# Altium footprint library WR-TBL_Pluggable Connector_3.50mm.PcbLib: 175 footprints (part 11 of 11)
Each footprint in its own frame and in the unit in brackets; x right, y up, seen from the top. Pads: shape width x height; smd on the part's side, far side on the other; paste and mask are expansions set on the pad; w line width, h text height; cw(c..) or ccw(c..) is an arc to the next point about the centre after c.
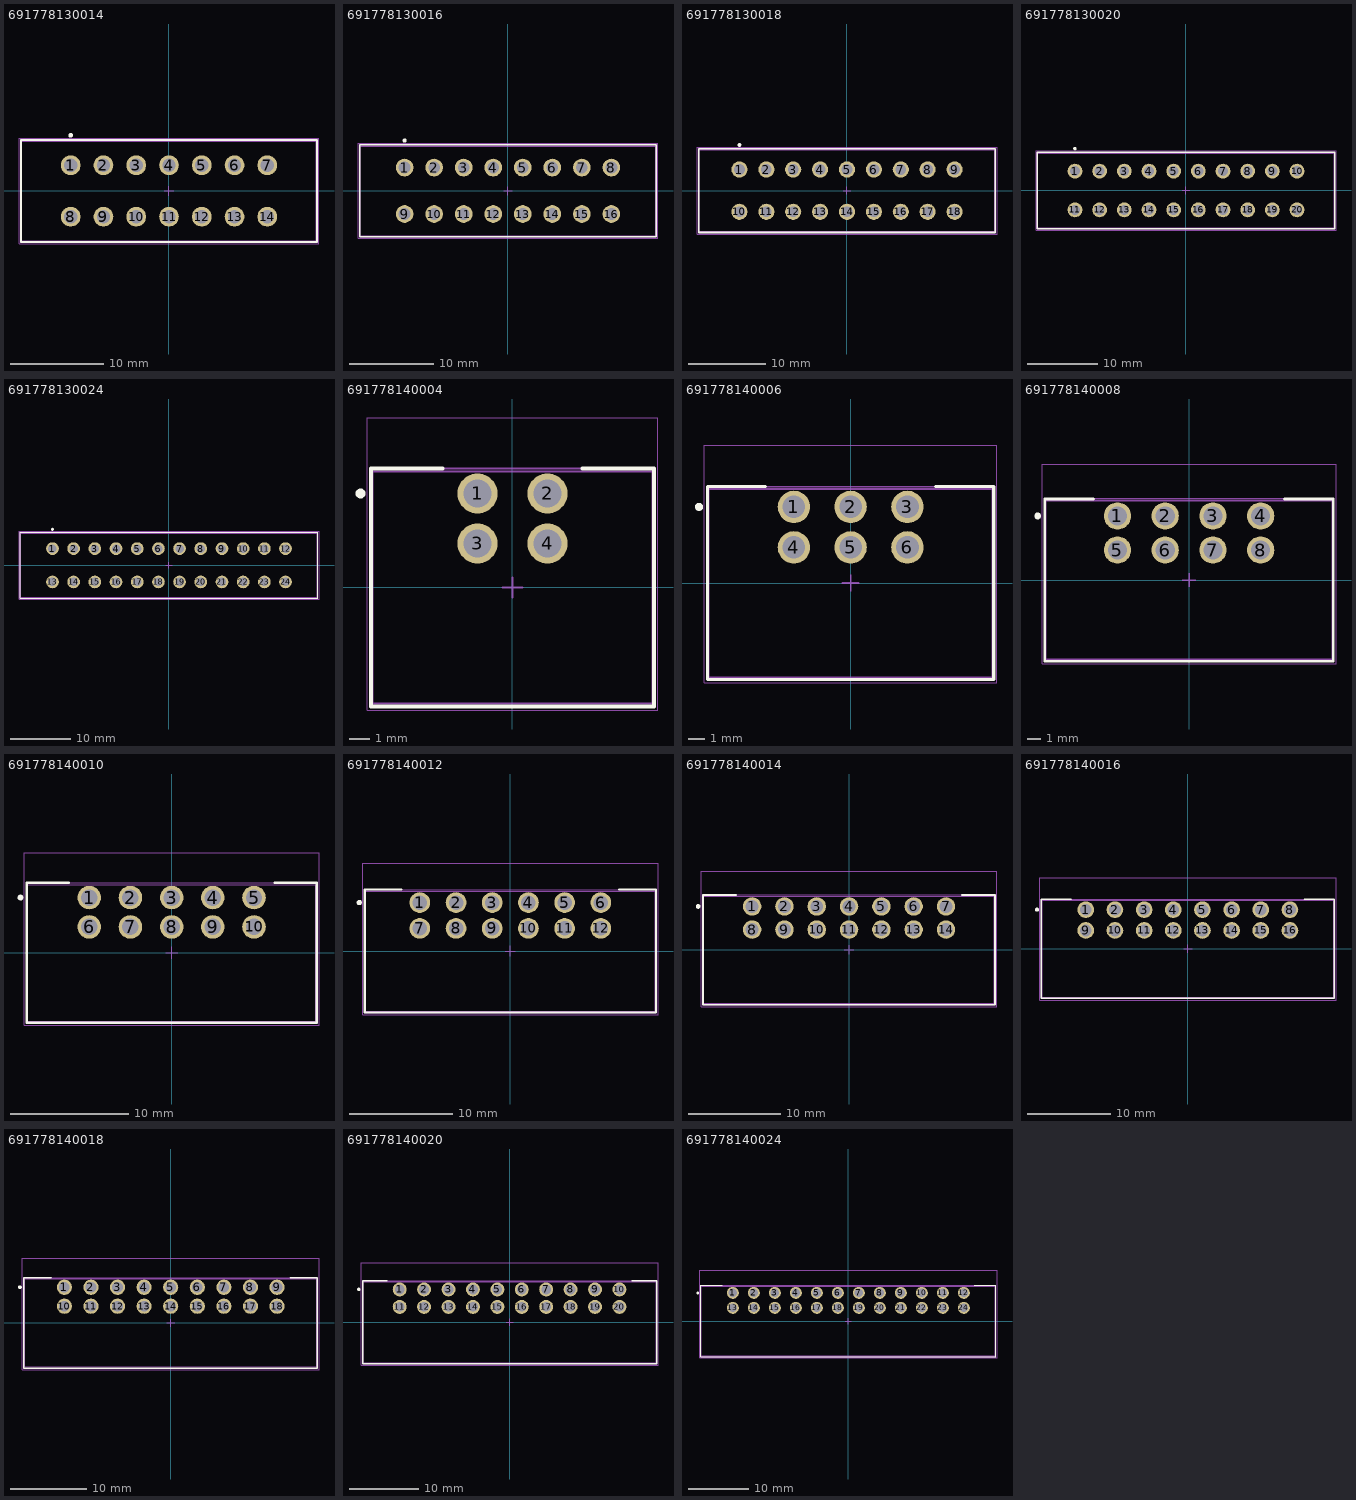
[diagram p10: the footprints below, top view; thin cyan lines are the x and y axes]

## 691778130014 [mm] "PCB Header, pitch 3.5mm, 14p"
height 10
pads (14):
  round 2.1 hole 1.4: 1(-10.5,2.75) 2(-7,2.75) 3(-3.5,2.75) 4(0,2.75) 5(3.5,2.75) 6(7,2.75) 7(10.5,2.75) 8(-10.5,-2.75) 9(-7,-2.75) 10(-3.5,-2.75) 11(0,-2.75) 12(3.5,-2.75) 13(7,-2.75) 14(10.5,-2.75)
Top Overlay:
  circle w0.25: c-10.5,5.95 r0.125
  lines w0.2: -15.825,-5.45 -15.825,5.45 15.825,5.45 15.825,-5.45 -15.825,-5.45
Top Paste:
  region: 9,-0.4 12,-0.4 12,-5.05 9,-5.05
  region: 5.5,-0.4 8.5,-0.4 8.5,-5.05 5.5,-5.05
  region: 2,-0.4 5,-0.4 5,-5.05 2,-5.05
  region: -1.5,-0.4 1.5,-0.4 1.5,-5.05 -1.5,-5.05
  region: -5,-0.4 -2,-0.4 -2,-5.05 -5,-5.05
  region: -8.5,-0.4 -5.5,-0.4 -5.5,-5.05 -8.5,-5.05
  region: -12,-0.4 -9,-0.4 -9,-5.05 -12,-5.05
  region: 9,5.1 12,5.1 12,0.45 9,0.45
  region: 5.5,5.1 8.5,5.1 8.5,0.45 5.5,0.45
  region: 2,5.1 5,5.1 5,0.45 2,0.45
  region: -5,5.1 -2,5.1 -2,0.45 -5,0.45
  region: -12,5.1 -9,5.1 -9,0.45 -12,0.45
  region: -8.5,5.1 -5.5,5.1 -5.5,0.45 -8.5,0.45
  region: -1.5,5.1 1.5,5.1 1.5,0.45 -1.5,0.45
Assembly Notes:
  text "Stencil Thickness: 120um" at -5.048,-6.37 h1
Top Assembly:
  lines w0.1: -15.825,-5.45 -15.825,5.45 15.825,5.45 15.825,-5.45 -15.825,-5.45
Top Designator:
  text ".Designator" at -3.647,-0.357 h1
Top 3D Body:
  lines w0.1: -15.75,-5.3 -15.75,5.3 15.75,5.3 15.75,-5.3 -15.75,-5.3
Top Courtyard:
  lines w0.05: -16.025,-5.65 -16.025,5.65 16.025,5.65 16.025,-5.65 -16.025,-5.65
Top Component Center:
  lines w0.1: -0.5,0 0.5,0 ; 0,-0.5 0,0.5
3D body "691778130014.stp": height 10.05, standoff -1.95, extent -15.75,-5.3 15.75,5.3

## 691778130016 [mm] "PCB Header, pitch 3.5mm, 16p"
height 10
pads (16):
  round 2.1 hole 1.4: 1(-12.25,2.75) 2(-8.75,2.75) 3(-5.25,2.75) 4(-1.75,2.75) 5(1.75,2.75) 6(5.25,2.75) 7(8.75,2.75) 8(12.25,2.75) 9(-12.25,-2.75) 10(-8.75,-2.75) 11(-5.25,-2.75) 12(-1.75,-2.75) 13(1.75,-2.75) 14(5.25,-2.75) 15(8.75,-2.75) 16(12.25,-2.75)
Top Overlay:
  circle w0.25: c-12.25,5.95 r0.125
  lines w0.2: -17.575,-5.45 -17.575,5.45 17.575,5.45 17.575,-5.45 -17.575,-5.45
Top Paste:
  region: 3.75,-0.4 6.75,-0.4 6.75,-5.05 3.75,-5.05
  region: 0.25,-0.4 3.25,-0.4 3.25,-5.05 0.25,-5.05
  region: -3.25,-0.4 -0.25,-0.4 -0.25,-5.05 -3.25,-5.05
  region: -6.75,-0.4 -3.75,-0.4 -3.75,-5.05 -6.75,-5.05
  region: -10.25,-0.4 -7.25,-0.4 -7.25,-5.05 -10.25,-5.05
  region: -13.75,-0.4 -10.75,-0.4 -10.75,-5.05 -13.75,-5.05
  region: 10.75,5.1 13.75,5.1 13.75,0.45 10.75,0.45
  region: 7.25,5.1 10.25,5.1 10.25,0.45 7.25,0.45
  region: 3.75,5.1 6.75,5.1 6.75,0.45 3.75,0.45
  region: 0.25,5.1 3.25,5.1 3.25,0.45 0.25,0.45
  region: -6.75,5.1 -3.75,5.1 -3.75,0.45 -6.75,0.45
  region: -13.75,5.1 -10.75,5.1 -10.75,0.45 -13.75,0.45
  region: -10.25,5.1 -7.25,5.1 -7.25,0.45 -10.25,0.45
  region: -3.25,5.1 -0.25,5.1 -0.25,0.45 -3.25,0.45
  region: 7.25,-0.4 10.25,-0.4 10.25,-5.05 7.25,-5.05
  region: 10.75,-0.4 13.75,-0.4 13.75,-5.05 10.75,-5.05
Assembly Notes:
  text "Stencil Thickness: 120um" at -5.048,-6.37 h1
Top Assembly:
  lines w0.1: -17.575,-5.45 -17.575,5.45 17.575,5.45 17.575,-5.45 -17.575,-5.45
Top Designator:
  text ".Designator" at -3.647,-0.357 h1
Top 3D Body:
  lines w0.1: -17.5,-5.3 -17.5,5.3 17.5,5.3 17.5,-5.3 -17.5,-5.3
Top Courtyard:
  lines w0.05: -17.775,-5.65 -17.775,5.65 17.775,5.65 17.775,-5.65 -17.775,-5.65
Top Component Center:
  lines w0.1: -0.5,0 0.5,0 ; 0,-0.5 0,0.5
3D body "691778130016.stp": height 10.05, standoff -1.95, extent -17.5,-5.3 17.5,5.3

## 691778130018 [mm] "PCB Header, pitch 3.5mm, 18p"
height 10
pads (18):
  round 2.1 hole 1.4: 1(-14,2.75) 2(-10.5,2.75) 3(-7,2.75) 4(-3.5,2.75) 5(0,2.75) 6(3.5,2.75) 7(7,2.75) 8(10.5,2.75) 9(14,2.75) 10(-14,-2.75) 11(-10.5,-2.75) 12(-7,-2.75) 13(-3.5,-2.75) 14(0,-2.75) 15(3.5,-2.75) 16(7,-2.75) 17(10.5,-2.75) 18(14,-2.75)
Top Overlay:
  circle w0.25: c-14,5.95 r0.125
  lines w0.2: -19.325,-5.45 -19.325,5.45 19.325,5.45 19.325,-5.45 -19.325,-5.45
Top Paste:
  region: -1.5,-0.4 1.5,-0.4 1.5,-5.05 -1.5,-5.05
  region: -5,-0.4 -2,-0.4 -2,-5.05 -5,-5.05
  region: -8.5,-0.4 -5.5,-0.4 -5.5,-5.05 -8.5,-5.05
  region: -12,-0.4 -9,-0.4 -9,-5.05 -12,-5.05
  region: -15.5,-0.4 -12.5,-0.4 -12.5,-5.05 -15.5,-5.05
  region: 12.5,5.1 15.5,5.1 15.5,0.45 12.5,0.45
  region: 9,5.1 12,5.1 12,0.45 9,0.45
  region: 5.5,5.1 8.5,5.1 8.5,0.45 5.5,0.45
  region: 2,5.1 5,5.1 5,0.45 2,0.45
  region: -1.5,5.1 1.5,5.1 1.5,0.45 -1.5,0.45
  region: -8.5,5.1 -5.5,5.1 -5.5,0.45 -8.5,0.45
  region: -15.5,5.1 -12.5,5.1 -12.5,0.45 -15.5,0.45
  region: -12,5.1 -9,5.1 -9,0.45 -12,0.45
  region: -5,5.1 -2,5.1 -2,0.45 -5,0.45
  region: 2,-0.4 5,-0.4 5,-5.05 2,-5.05
  region: 5.5,-0.4 8.5,-0.4 8.5,-5.05 5.5,-5.05
  region: 9,-0.4 12,-0.4 12,-5.05 9,-5.05
  region: 12.5,-0.4 15.5,-0.4 15.5,-5.05 12.5,-5.05
Assembly Notes:
  text "Stencil Thickness: 120um" at -5.048,-6.37 h1
Top Assembly:
  lines w0.1: -19.325,-5.45 -19.325,5.45 19.325,5.45 19.325,-5.45 -19.325,-5.45
Top Designator:
  text ".Designator" at -3.647,-0.357 h1
Top 3D Body:
  lines w0.1: -19.25,-5.3 -19.25,5.3 19.25,5.3 19.25,-5.3 -19.25,-5.3
Top Courtyard:
  lines w0.05: -19.525,-5.65 -19.525,5.65 19.525,5.65 19.525,-5.65 -19.525,-5.65
Top Component Center:
  lines w0.1: -0.5,0 0.5,0 ; 0,-0.5 0,0.5
3D body "691778130018.stp": height 10.05, standoff -1.95, extent -19.25,-5.3 19.25,5.3

## 691778130020 [mm] "PCB Header, pitch 3.5mm, 20p"
height 10
pads (20):
  round 2.1 hole 1.4: 1(-15.75,2.75) 2(-12.25,2.75) 3(-8.75,2.75) 4(-5.25,2.75) 5(-1.75,2.75) 6(1.75,2.75) 7(5.25,2.75) 8(8.75,2.75) 9(12.25,2.75) 10(15.75,2.75) 11(-15.75,-2.75) 12(-12.25,-2.75) 13(-8.75,-2.75) 14(-5.25,-2.75) 15(-1.75,-2.75) 16(1.75,-2.75) 17(5.25,-2.75) 18(8.75,-2.75) 19(12.25,-2.75) 20(15.75,-2.75)
Top Overlay:
  circle w0.25: c-15.75,5.95 r0.125
  lines w0.2: -21.075,-5.45 -21.075,5.45 21.075,5.45 21.075,-5.45 -21.075,-5.45
Top Paste:
  region: -6.75,-0.4 -3.75,-0.4 -3.75,-5.05 -6.75,-5.05
  region: -10.25,-0.4 -7.25,-0.4 -7.25,-5.05 -10.25,-5.05
  region: -13.75,-0.4 -10.75,-0.4 -10.75,-5.05 -13.75,-5.05
  region: -17.25,-0.4 -14.25,-0.4 -14.25,-5.05 -17.25,-5.05
  region: 14.25,5.1 17.25,5.1 17.25,0.45 14.25,0.45
  region: 10.75,5.1 13.75,5.1 13.75,0.45 10.75,0.45
  region: 7.25,5.1 10.25,5.1 10.25,0.45 7.25,0.45
  region: 3.75,5.1 6.75,5.1 6.75,0.45 3.75,0.45
  region: 0.25,5.1 3.25,5.1 3.25,0.45 0.25,0.45
  region: -3.25,5.1 -0.25,5.1 -0.25,0.45 -3.25,0.45
  region: -10.25,5.1 -7.25,5.1 -7.25,0.45 -10.25,0.45
  region: -17.25,5.1 -14.25,5.1 -14.25,0.45 -17.25,0.45
  region: -13.75,5.1 -10.75,5.1 -10.75,0.45 -13.75,0.45
  region: -6.75,5.1 -3.75,5.1 -3.75,0.45 -6.75,0.45
  region: -3.25,-0.4 -0.25,-0.4 -0.25,-5.05 -3.25,-5.05
  region: 0.25,-0.4 3.25,-0.4 3.25,-5.05 0.25,-5.05
  region: 3.75,-0.4 6.75,-0.4 6.75,-5.05 3.75,-5.05
  region: 7.25,-0.4 10.25,-0.4 10.25,-5.05 7.25,-5.05
  region: 10.75,-0.4 13.75,-0.4 13.75,-5.05 10.75,-5.05
  region: 14.25,-0.4 17.25,-0.4 17.25,-5.05 14.25,-5.05
Assembly Notes:
  text "Stencil Thickness: 120um" at -5.048,-6.37 h1
Top Assembly:
  lines w0.1: -21.075,-5.45 -21.075,5.45 21.075,5.45 21.075,-5.45 -21.075,-5.45
Top Designator:
  text ".Designator" at -3.647,-0.357 h1
Top 3D Body:
  lines w0.1: -21,-5.3 -21,5.3 21,5.3 21,-5.3 -21,-5.3
Top Courtyard:
  lines w0.05: -21.275,-5.65 -21.275,5.65 21.275,5.65 21.275,-5.65 -21.275,-5.65
Top Component Center:
  lines w0.1: -0.5,0 0.5,0 ; 0,-0.5 0,0.5
3D body "691778130020.stp": height 10.05, standoff -1.95, extent -21,-5.3 21,5.3

## 691778130024 [mm] "PCB Header, pitch 3.5mm, 24p"
height 10
pads (24):
  round 2.1 hole 1.4: 1(-19.25,2.75) 2(-15.75,2.75) 3(-12.25,2.75) 4(-8.75,2.75) 5(-5.25,2.75) 6(-1.75,2.75) 7(1.75,2.75) 8(5.25,2.75) 9(8.75,2.75) 10(12.25,2.75) 11(15.75,2.75) 12(19.25,2.75) 13(-19.25,-2.75) 14(-15.75,-2.75) 15(-12.25,-2.75) 16(-8.75,-2.75) 17(-5.25,-2.75) 18(-1.75,-2.75) 19(1.75,-2.75) 20(5.25,-2.75) 21(8.75,-2.75) 22(12.25,-2.75) 23(15.75,-2.75) 24(19.25,-2.75)
Top Overlay:
  circle w0.25: c-19.25,5.95 r0.125
  lines w0.2: -24.575,-5.45 24.575,-5.45 24.575,5.45 -24.575,5.45 -24.575,-5.45
Top Paste:
  region: 17.75,-0.4 20.75,-0.4 20.75,-5.05 17.75,-5.05
  region: 14.25,-0.4 17.25,-0.4 17.25,-5.05 14.25,-5.05
  region: 10.75,-0.4 13.75,-0.4 13.75,-5.05 10.75,-5.05
  region: 7.25,-0.4 10.25,-0.4 10.25,-5.05 7.25,-5.05
  region: 3.75,-0.4 6.75,-0.4 6.75,-5.05 3.75,-5.05
  region: 0.25,-0.4 3.25,-0.4 3.25,-5.05 0.25,-5.05
  region: -3.25,-0.4 -0.25,-0.4 -0.25,-5.05 -3.25,-5.05
  region: -6.75,-0.4 -3.75,-0.4 -3.75,-5.05 -6.75,-5.05
  region: -10.25,-0.4 -7.25,-0.4 -7.25,-5.05 -10.25,-5.05
  region: -13.75,-0.4 -10.75,-0.4 -10.75,-5.05 -13.75,-5.05
  region: -10.25,5.1 -7.25,5.1 -7.25,0.45 -10.25,0.45
  region: -17.25,5.1 -14.25,5.1 -14.25,0.45 -17.25,0.45
  region: -20.75,5.1 -17.75,5.1 -17.75,0.45 -20.75,0.45
  region: -13.75,5.1 -10.75,5.1 -10.75,0.45 -13.75,0.45
  region: -6.75,5.1 -3.75,5.1 -3.75,0.45 -6.75,0.45
  region: -3.25,5.1 -0.25,5.1 -0.25,0.45 -3.25,0.45
  region: 0.25,5.1 3.25,5.1 3.25,0.45 0.25,0.45
  region: 3.75,5.1 6.75,5.1 6.75,0.45 3.75,0.45
  region: 7.25,5.1 10.25,5.1 10.25,0.45 7.25,0.45
  region: 10.75,5.1 13.75,5.1 13.75,0.45 10.75,0.45
  region: 14.25,5.1 17.25,5.1 17.25,0.45 14.25,0.45
  region: 17.75,5.1 20.75,5.1 20.75,0.45 17.75,0.45
  region: -20.75,-0.4 -17.75,-0.4 -17.75,-5.05 -20.75,-5.05
  region: -17.25,-0.4 -14.25,-0.4 -14.25,-5.05 -17.25,-5.05
Assembly Notes:
  text "Stencil Thickness: 120um" at -5.048,-6.37 h1
Top Assembly:
  lines w0.1: -24.575,-5.45 24.575,-5.45 24.575,5.45 -24.575,5.45 -24.575,-5.45
Top Designator:
  text ".Designator" at -3.647,-0.357 h1
Top 3D Body:
  lines w0.1: -24.5,-5.3 24.5,-5.3 24.5,5.3 -24.5,5.3 -24.5,-5.3
Top Courtyard:
  lines w0.05: -24.775,-5.65 24.775,-5.65 24.775,5.65 -24.775,5.65 -24.775,-5.65
Top Component Center:
  lines w0.1: -0.5,0 0.5,0 ; 0,-0.5 0,0.5
3D body "691778130024.stp": height 10.05, standoff -1.95, extent -24.5,-5.3 24.5,5.3

## 691778140004 [mm] "PCB Header, pitch 3.5mm, 04p"
height 10.8
pads (4):
  round 2 hole 1.4: 1(-1.75,4.7) 2(1.75,4.7) 3(-1.75,2.2) 4(1.75,2.2)
Top Overlay:
  circle w0.25: c-7.6,4.7 r0.125
  lines w0.2: -3.5,5.95 -7.075,5.95 -7.075,-5.95 7.075,-5.95 7.075,5.95 3.5,5.95
Top Paste:
  region: -3.25,8.3 -0.25,8.3 -0.25,3.7 -3.25,3.7
  region: 0.25,8.3 3.25,8.3 3.25,3.7 0.25,3.7
  region: -3.25,-1.4 -0.25,-1.4 -0.25,3.2 -3.25,3.2
  region: 0.25,-1.4 3.25,-1.4 3.25,3.2 0.25,3.2
Assembly Notes:
  text "Stencil Thickness: 120um" at -5.048,-6.92 h1
Top Assembly:
  lines w0.1: -7.075,-5.95 -7.075,5.95 7.075,5.95 7.075,-5.95 -7.075,-5.95
Top Designator:
  text ".Designator" at -3.647,-0.357 h1
Top 3D Body:
  lines w0.1: -7,-5.8 -7,5.8 7,5.8 7,-5.8 -7,-5.8
Top Courtyard:
  lines w0.05: -7.275,-6.15 -7.275,8.5 7.275,8.5 7.275,-6.15 -7.275,-6.15
Top Component Center:
  lines w0.1: -0.5,0 0.5,0 ; 0,-0.5 0,0.5
3D body "691778140004.stp": height 10.82, standoff -1.98, extent -7,-5.8 7,5.8

## 691778140006 [mm] "PCB Header, pitch 3.5mm, 06p"
height 10.8
pads (6):
  round 2 hole 1.4: 1(-3.5,4.7) 2(0,4.7) 3(3.5,4.7) 4(-3.5,2.2) 5(0,2.2) 6(3.5,2.2)
Top Overlay:
  circle w0.25: c-9.35,4.7 r0.125
  lines w0.2: -5.25,5.95 -8.825,5.95 -8.825,-5.95 8.825,-5.95 8.825,5.95 5.25,5.95
Top Paste:
  region: -5,8.3 -2,8.3 -2,3.7 -5,3.7
  region: -1.5,8.3 1.5,8.3 1.5,3.7 -1.5,3.7
  region: -5,-1.4 -2,-1.4 -2,3.2 -5,3.2
  region: -1.5,-1.4 1.5,-1.4 1.5,3.2 -1.5,3.2
  region: 2,8.3 5,8.3 5,3.7 2,3.7
  region: 2,-1.4 5,-1.4 5,3.2 2,3.2
Assembly Notes:
  text "Stencil Thickness: 120um" at -5.048,-6.92 h1
Top Assembly:
  lines w0.1: -8.825,-5.95 -8.825,5.95 8.825,5.95 8.825,-5.95 -8.825,-5.95
Top Designator:
  text ".Designator" at -3.647,-0.357 h1
Top 3D Body:
  lines w0.1: -8.75,-5.8 -8.75,5.8 8.75,5.8 8.75,-5.8 -8.75,-5.8
Top Courtyard:
  lines w0.05: -9.025,-6.15 -9.025,8.5 9.025,8.5 9.025,-6.15 -9.025,-6.15
Top Component Center:
  lines w0.1: -0.5,0 0.5,0 ; 0,-0.5 0,0.5
3D body "691778140006.stp": height 10.82, standoff -1.98, extent -8.75,-5.8 8.75,5.8

## 691778140008 [mm] "PCB Header, pitch 3.5mm, 08p"
height 10.8
pads (8):
  round 2 hole 1.4: 1(-5.25,4.7) 2(-1.75,4.7) 3(1.75,4.7) 4(5.25,4.7) 5(-5.25,2.2) 6(-1.75,2.2) 7(1.75,2.2) 8(5.25,2.2)
Top Overlay:
  circle w0.25: c-11.1,4.7 r0.125
  lines w0.2: -7,5.95 -10.575,5.95 -10.575,-5.95 10.575,-5.95 10.575,5.95 7,5.95
Top Paste:
  region: 0.25,-1.4 3.25,-1.4 3.25,3.2 0.25,3.2
  region: 0.25,8.3 3.25,8.3 3.25,3.7 0.25,3.7
  region: -3.25,-1.4 -0.25,-1.4 -0.25,3.2 -3.25,3.2
  region: -6.75,-1.4 -3.75,-1.4 -3.75,3.2 -6.75,3.2
  region: -3.25,8.3 -0.25,8.3 -0.25,3.7 -3.25,3.7
  region: -6.75,8.3 -3.75,8.3 -3.75,3.7 -6.75,3.7
  region: 3.75,8.3 6.75,8.3 6.75,3.7 3.75,3.7
  region: 3.75,-1.4 6.75,-1.4 6.75,3.2 3.75,3.2
Assembly Notes:
  text "Stencil Thickness: 120um" at -5.048,-6.92 h1
Top Assembly:
  lines w0.1: -10.575,-5.95 10.575,-5.95 10.575,5.95 -10.575,5.95 -10.575,-5.95
Top Designator:
  text ".Designator" at -3.647,-0.357 h1
Top 3D Body:
  lines w0.1: -10.5,-5.8 10.5,-5.8 10.5,5.8 -10.5,5.8 -10.5,-5.8
Top Courtyard:
  lines w0.05: -10.775,-6.15 10.775,-6.15 10.775,8.5 -10.775,8.5 -10.775,-6.15
Top Component Center:
  lines w0.1: -0.5,0 0.5,0 ; 0,-0.5 0,0.5
3D body "691778140008.stp": height 10.82, standoff -1.98, extent -10.5,-5.8 10.5,5.8

## 691778140010 [mm] "PCB Header, pitch 3.5mm, 10p"
height 10.8
pads (10):
  round 2 hole 1.4: 1(-7,4.7) 2(-3.5,4.7) 3(0,4.7) 4(3.5,4.7) 5(7,4.7) 6(-7,2.2) 7(-3.5,2.2) 8(0,2.2) 9(3.5,2.2) 10(7,2.2)
Top Overlay:
  circle w0.25: c-12.85,4.7 r0.125
  lines w0.2: -8.75,5.95 -12.325,5.95 -12.325,-5.95 12.325,-5.95 12.325,5.95 8.75,5.95
Top Paste:
  region: 5.5,-1.4 8.5,-1.4 8.5,3.2 5.5,3.2
  region: 5.5,8.3 8.5,8.3 8.5,3.7 5.5,3.7
  region: 2,-1.4 5,-1.4 5,3.2 2,3.2
  region: 2,8.3 5,8.3 5,3.7 2,3.7
  region: -8.5,8.3 -5.5,8.3 -5.5,3.7 -8.5,3.7
  region: -5,8.3 -2,8.3 -2,3.7 -5,3.7
  region: -8.5,-1.4 -5.5,-1.4 -5.5,3.2 -8.5,3.2
  region: -5,-1.4 -2,-1.4 -2,3.2 -5,3.2
  region: -1.5,8.3 1.5,8.3 1.5,3.7 -1.5,3.7
  region: -1.5,-1.4 1.5,-1.4 1.5,3.2 -1.5,3.2
Assembly Notes:
  text "Stencil Thickness: 120um" at -5.048,-6.92 h1
Top Assembly:
  lines w0.1: -12.325,-5.95 -12.325,5.95 12.325,5.95 12.325,-5.95 -12.325,-5.95
Top Designator:
  text ".Designator" at -3.647,-0.357 h1
Top 3D Body:
  lines w0.1: -12.25,-5.8 -12.25,5.8 12.25,5.8 12.25,-5.8 -12.25,-5.8
Top Courtyard:
  lines w0.05: -12.525,-6.15 -12.525,8.5 12.525,8.5 12.525,-6.15 -12.525,-6.15
Top Component Center:
  lines w0.1: -0.5,0 0.5,0 ; 0,-0.5 0,0.5
3D body "691778140010.stp": height 10.82, standoff -1.98, extent -12.25,-5.8 12.25,5.8

## 691778140012 [mm] "PCB Header, pitch 3.5mm, 12p"
height 10.8
pads (12):
  round 2 hole 1.4: 1(-8.75,4.7) 2(-5.25,4.7) 3(-1.75,4.7) 4(1.75,4.7) 5(5.25,4.7) 6(8.75,4.7) 7(-8.75,2.2) 8(-5.25,2.2) 9(-1.75,2.2) 10(1.75,2.2) 11(5.25,2.2) 12(8.75,2.2)
Top Overlay:
  circle w0.25: c-14.6,4.7 r0.125
  lines w0.2: -10.5,5.95 -14.075,5.95 -14.075,-5.95 14.075,-5.95 14.075,5.95 10.5,5.95
Top Paste:
  region: -3.25,-1.4 -0.25,-1.4 -0.25,3.2 -3.25,3.2
  region: -3.25,8.3 -0.25,8.3 -0.25,3.7 -3.25,3.7
  region: -6.75,-1.4 -3.75,-1.4 -3.75,3.2 -6.75,3.2
  region: -10.25,-1.4 -7.25,-1.4 -7.25,3.2 -10.25,3.2
  region: -6.75,8.3 -3.75,8.3 -3.75,3.7 -6.75,3.7
  region: -10.25,8.3 -7.25,8.3 -7.25,3.7 -10.25,3.7
  region: 0.25,8.3 3.25,8.3 3.25,3.7 0.25,3.7
  region: 0.25,-1.4 3.25,-1.4 3.25,3.2 0.25,3.2
  region: 3.75,8.3 6.75,8.3 6.75,3.7 3.75,3.7
  region: 3.75,-1.4 6.75,-1.4 6.75,3.2 3.75,3.2
  region: 7.25,8.3 10.25,8.3 10.25,3.7 7.25,3.7
  region: 7.25,-1.4 10.25,-1.4 10.25,3.2 7.25,3.2
Assembly Notes:
  text "Stencil Thickness: 120um" at -5.048,-6.92 h1
Top Assembly:
  lines w0.1: -14.075,-5.95 14.075,-5.95 14.075,5.95 -14.075,5.95 -14.075,-5.95
Top Designator:
  text ".Designator" at -3.647,-0.357 h1
Top 3D Body:
  lines w0.1: -14,-5.8 14,-5.8 14,5.8 -14,5.8 -14,-5.8
Top Courtyard:
  lines w0.05: -14.275,-6.15 14.275,-6.15 14.275,8.5 -14.275,8.5 -14.275,-6.15
Top Component Center:
  lines w0.1: -0.5,0 0.5,0 ; 0,-0.5 0,0.5
3D body "691778140012.stp": height 10.82, standoff -1.98, extent -14,-5.8 14,5.8

## 691778140014 [mm] "PCB Header, pitch 3.5mm, 14p"
height 10.8
pads (14):
  round 2 hole 1.4: 1(-10.5,4.7) 2(-7,4.7) 3(-3.5,4.7) 4(0,4.7) 5(3.5,4.7) 6(7,4.7) 7(10.5,4.7) 8(-10.5,2.2) 9(-7,2.2) 10(-3.5,2.2) 11(0,2.2) 12(3.5,2.2) 13(7,2.2) 14(10.5,2.2)
Top Overlay:
  circle w0.25: c-16.35,4.7 r0.125
  lines w0.2: -12.25,5.95 -15.825,5.95 -15.825,-5.95 15.825,-5.95 15.825,5.95 12.25,5.95
Top Paste:
  region: -8.5,-1.4 -5.5,-1.4 -5.5,3.2 -8.5,3.2
  region: -5,8.3 -2,8.3 -2,3.7 -5,3.7
  region: -12,-1.4 -9,-1.4 -9,3.2 -12,3.2
  region: -8.5,8.3 -5.5,8.3 -5.5,3.7 -8.5,3.7
  region: -12,8.3 -9,8.3 -9,3.7 -12,3.7
  region: -1.5,8.3 1.5,8.3 1.5,3.7 -1.5,3.7
  region: -5,-1.4 -2,-1.4 -2,3.2 -5,3.2
  region: 2,8.3 5,8.3 5,3.7 2,3.7
  region: -1.5,-1.4 1.5,-1.4 1.5,3.2 -1.5,3.2
  region: 5.5,8.3 8.5,8.3 8.5,3.7 5.5,3.7
  region: 2,-1.4 5,-1.4 5,3.2 2,3.2
  region: 5.5,-1.4 8.5,-1.4 8.5,3.2 5.5,3.2
  region: 9,-1.4 12,-1.4 12,3.2 9,3.2
  region: 9,8.3 12,8.3 12,3.7 9,3.7
Assembly Notes:
  text "Stencil Thickness: 120um" at -5.048,-6.92 h1
Top Assembly:
  lines w0.1: -15.825,-5.95 15.825,-5.95 15.825,5.95 -15.825,5.95 -15.825,-5.95
Top Designator:
  text ".Designator" at -3.647,-0.357 h1
Top 3D Body:
  lines w0.1: -15.75,-5.8 15.75,-5.8 15.75,5.8 -15.75,5.8 -15.75,-5.8
Top Courtyard:
  lines w0.05: -16.025,-6.15 16.025,-6.15 16.025,8.5 -16.025,8.5 -16.025,-6.15
Top Component Center:
  lines w0.1: -0.5,0 0.5,0 ; 0,-0.5 0,0.5
3D body "691778140014.stp": height 10.82, standoff -1.98, extent -15.75,-5.8 15.75,5.8

## 691778140016 [mm] "PCB Header, pitch 3.5mm, 16p"
height 10.8
pads (16):
  round 2 hole 1.4: 1(-12.25,4.7) 2(-8.75,4.7) 3(-5.25,4.7) 4(-1.75,4.7) 5(1.75,4.7) 6(5.25,4.7) 7(8.75,4.7) 8(12.25,4.7) 9(-12.25,2.2) 10(-8.75,2.2) 11(-5.25,2.2) 12(-1.75,2.2) 13(1.75,2.2) 14(5.25,2.2) 15(8.75,2.2) 16(12.25,2.2)
Top Overlay:
  circle w0.25: c-18.1,4.7 r0.125
  lines w0.2: -14,5.95 -17.575,5.95 -17.575,-5.95 17.575,-5.95 17.575,5.95 14,5.95
Top Paste:
  region: -13.75,-1.4 -10.75,-1.4 -10.75,3.2 -13.75,3.2
  region: -6.75,8.3 -3.75,8.3 -3.75,3.7 -6.75,3.7
  region: -10.25,8.3 -7.25,8.3 -7.25,3.7 -10.25,3.7
  region: -13.75,8.3 -10.75,8.3 -10.75,3.7 -13.75,3.7
  region: -3.25,8.3 -0.25,8.3 -0.25,3.7 -3.25,3.7
  region: -10.25,-1.4 -7.25,-1.4 -7.25,3.2 -10.25,3.2
  region: 0.25,8.3 3.25,8.3 3.25,3.7 0.25,3.7
  region: -6.75,-1.4 -3.75,-1.4 -3.75,3.2 -6.75,3.2
  region: 3.75,8.3 6.75,8.3 6.75,3.7 3.75,3.7
  region: -3.25,-1.4 -0.25,-1.4 -0.25,3.2 -3.25,3.2
  region: 0.25,-1.4 3.25,-1.4 3.25,3.2 0.25,3.2
  region: 3.75,-1.4 6.75,-1.4 6.75,3.2 3.75,3.2
  region: 7.25,8.3 10.25,8.3 10.25,3.7 7.25,3.7
  region: 7.25,-1.4 10.25,-1.4 10.25,3.2 7.25,3.2
  region: 10.75,-1.4 13.75,-1.4 13.75,3.2 10.75,3.2
  region: 10.75,8.3 13.75,8.3 13.75,3.7 10.75,3.7
Assembly Notes:
  text "Stencil Thickness: 120um" at -5.048,-6.92 h1
Top Assembly:
  lines w0.1: -17.575,-5.95 17.575,-5.95 17.575,5.95 -17.575,5.95 -17.575,-5.95
Top Designator:
  text ".Designator" at -3.647,-0.357 h1
Top 3D Body:
  lines w0.1: -17.5,-5.8 17.5,-5.8 17.5,5.8 -17.5,5.8 -17.5,-5.8
Top Courtyard:
  lines w0.05: -17.775,-6.15 17.775,-6.15 17.775,8.5 -17.775,8.5 -17.775,-6.15
Top Component Center:
  lines w0.1: -0.5,0 0.5,0 ; 0,-0.5 0,0.5
3D body "691778140016.stp": height 10.82, standoff -1.98, extent -17.5,-5.8 17.5,5.8

## 691778140018 [mm] "PCB Header, pitch 3.5mm, 18p"
height 10.8
pads (18):
  round 2 hole 1.4: 1(-14,4.7) 2(-10.5,4.7) 3(-7,4.7) 4(-3.5,4.7) 5(0,4.7) 6(3.5,4.7) 7(7,4.7) 8(10.5,4.7) 9(14,4.7) 10(-14,2.2) 11(-10.5,2.2) 12(-7,2.2) 13(-3.5,2.2) 14(0,2.2) 15(3.5,2.2) 16(7,2.2) 17(10.5,2.2) 18(14,2.2)
Top Overlay:
  circle w0.25: c-19.85,4.7 r0.125
  lines w0.2: -15.75,5.95 -19.325,5.95 -19.325,-5.95 19.325,-5.95 19.325,5.95 15.75,5.95
Top Paste:
  region: 12.5,8.3 15.5,8.3 15.5,3.7 12.5,3.7
  region: 12.5,-1.4 15.5,-1.4 15.5,3.2 12.5,3.2
  region: 9,-1.4 12,-1.4 12,3.2 9,3.2
  region: 9,8.3 12,8.3 12,3.7 9,3.7
  region: 5.5,-1.4 8.5,-1.4 8.5,3.2 5.5,3.2
  region: 2,-1.4 5,-1.4 5,3.2 2,3.2
  region: 5.5,8.3 8.5,8.3 8.5,3.7 5.5,3.7
  region: -1.5,-1.4 1.5,-1.4 1.5,3.2 -1.5,3.2
  region: -5,-1.4 -2,-1.4 -2,3.2 -5,3.2
  region: -8.5,-1.4 -5.5,-1.4 -5.5,3.2 -8.5,3.2
  region: 2,8.3 5,8.3 5,3.7 2,3.7
  region: -12,-1.4 -9,-1.4 -9,3.2 -12,3.2
  region: -1.5,8.3 1.5,8.3 1.5,3.7 -1.5,3.7
  region: -15.5,-1.4 -12.5,-1.4 -12.5,3.2 -15.5,3.2
  region: -5,8.3 -2,8.3 -2,3.7 -5,3.7
  region: -15.5,8.3 -12.5,8.3 -12.5,3.7 -15.5,3.7
  region: -12,8.3 -9,8.3 -9,3.7 -12,3.7
  region: -8.5,8.3 -5.5,8.3 -5.5,3.7 -8.5,3.7
Assembly Notes:
  text "Stencil Thickness: 120um" at -5.048,-6.92 h1
Top Assembly:
  lines w0.1: -19.325,-5.95 -19.325,5.95 19.325,5.95 19.325,-5.95 -19.325,-5.95
Top Designator:
  text ".Designator" at -3.647,-0.357 h1
Top 3D Body:
  lines w0.1: -19.25,-5.8 -19.25,5.8 19.25,5.8 19.25,-5.8 -19.25,-5.8
Top Courtyard:
  lines w0.05: -19.525,-6.15 -19.525,8.5 19.525,8.5 19.525,-6.15 -19.525,-6.15
Top Component Center:
  lines w0.1: -0.5,0 0.5,0 ; 0,-0.5 0,0.5
3D body "691778140018.stp": height 10.82, standoff -1.98, extent -19.25,-5.8 19.25,5.8

## 691778140020 [mm] "PCB Header, pitch 3.5mm, 20p"
height 10.8
pads (20):
  round 2 hole 1.4: 1(-15.75,4.7) 2(-12.25,4.7) 3(-8.75,4.7) 4(-5.25,4.7) 5(-1.75,4.7) 6(1.75,4.7) 7(5.25,4.7) 8(8.75,4.7) 9(12.25,4.7) 10(15.75,4.7) 11(-15.75,2.2) 12(-12.25,2.2) 13(-8.75,2.2) 14(-5.25,2.2) 15(-1.75,2.2) 16(1.75,2.2) 17(5.25,2.2) 18(8.75,2.2) 19(12.25,2.2) 20(15.75,2.2)
Top Overlay:
  circle w0.25: c-21.6,4.7 r0.125
  lines w0.2: -17.5,5.95 -21.075,5.95 -21.075,-5.95 21.075,-5.95 ; 17.5,5.95 21.075,5.95 21.075,-5.95
Top Paste:
  region: -10.25,8.3 -7.25,8.3 -7.25,3.7 -10.25,3.7
  region: -13.75,8.3 -10.75,8.3 -10.75,3.7 -13.75,3.7
  region: -17.25,8.3 -14.25,8.3 -14.25,3.7 -17.25,3.7
  region: -6.75,8.3 -3.75,8.3 -3.75,3.7 -6.75,3.7
  region: -3.25,8.3 -0.25,8.3 -0.25,3.7 -3.25,3.7
  region: -17.25,-1.4 -14.25,-1.4 -14.25,3.2 -17.25,3.2
  region: 0.25,8.3 3.25,8.3 3.25,3.7 0.25,3.7
  region: -13.75,-1.4 -10.75,-1.4 -10.75,3.2 -13.75,3.2
  region: -10.25,-1.4 -7.25,-1.4 -7.25,3.2 -10.25,3.2
  region: -6.75,-1.4 -3.75,-1.4 -3.75,3.2 -6.75,3.2
  region: 3.75,8.3 6.75,8.3 6.75,3.7 3.75,3.7
  region: -3.25,-1.4 -0.25,-1.4 -0.25,3.2 -3.25,3.2
  region: 0.25,-1.4 3.25,-1.4 3.25,3.2 0.25,3.2
  region: 7.25,8.3 10.25,8.3 10.25,3.7 7.25,3.7
  region: 3.75,-1.4 6.75,-1.4 6.75,3.2 3.75,3.2
  region: 7.25,-1.4 10.25,-1.4 10.25,3.2 7.25,3.2
  region: 10.75,8.3 13.75,8.3 13.75,3.7 10.75,3.7
  region: 14.25,8.3 17.25,8.3 17.25,3.7 14.25,3.7
  region: 10.75,-1.4 13.75,-1.4 13.75,3.2 10.75,3.2
  region: 14.25,-1.4 17.25,-1.4 17.25,3.2 14.25,3.2
Assembly Notes:
  text "Stencil Thickness: 120um" at -5.048,-6.92 h1
Top Assembly:
  lines w0.1: -21.075,-5.95 21.075,-5.95 21.075,5.95 -21.075,5.95 -21.075,-5.95
Top Designator:
  text ".Designator" at -3.647,-0.357 h1
Top 3D Body:
  lines w0.1: -21,-5.8 21,-5.8 21,5.8 -21,5.8 -21,-5.8
Top Courtyard:
  lines w0.05: -21.275,-6.15 21.275,-6.15 21.275,8.5 -21.275,8.5 -21.275,-6.15
Top Component Center:
  lines w0.1: -0.5,0 0.5,0 ; 0,-0.5 0,0.5
3D body "691778140020.stp": height 10.82, standoff -1.98, extent -21,-5.8 21,5.8

## 691778140024 [mm] "PCB Header, pitch 3.5mm, 24p"
height 10.8
pads (24):
  round 2 hole 1.4: 1(-19.25,4.7) 2(-15.75,4.7) 3(-12.25,4.7) 4(-8.75,4.7) 5(-5.25,4.7) 6(-1.75,4.7) 7(1.75,4.7) 8(5.25,4.7) 9(8.75,4.7) 10(12.25,4.7) 11(15.75,4.7) 12(19.25,4.7) 13(-19.25,2.2) 14(-15.75,2.2) 15(-12.25,2.2) 16(-8.75,2.2) 17(-5.25,2.2) 18(-1.75,2.2) 19(1.75,2.2) 20(5.25,2.2) 21(8.75,2.2) 22(12.25,2.2) 23(15.75,2.2) 24(19.25,2.2)
Top Overlay:
  circle w0.25: c-25.1,4.7 r0.125
  lines w0.2: -21,5.95 -24.575,5.95 -24.575,-5.95 24.575,-5.95 24.575,5.95 21,5.95
Top Paste:
  region: 17.75,8.3 20.75,8.3 20.75,3.7 17.75,3.7
  region: 14.25,8.3 17.25,8.3 17.25,3.7 14.25,3.7
  region: 17.75,-1.4 20.75,-1.4 20.75,3.2 17.75,3.2
  region: 14.25,-1.4 17.25,-1.4 17.25,3.2 14.25,3.2
  region: 10.75,-1.4 13.75,-1.4 13.75,3.2 10.75,3.2
  region: 7.25,-1.4 10.25,-1.4 10.25,3.2 7.25,3.2
  region: 3.75,-1.4 6.75,-1.4 6.75,3.2 3.75,3.2
  region: 0.25,-1.4 3.25,-1.4 3.25,3.2 0.25,3.2
  region: 10.75,8.3 13.75,8.3 13.75,3.7 10.75,3.7
  region: 7.25,8.3 10.25,8.3 10.25,3.7 7.25,3.7
  region: -3.25,-1.4 -0.25,-1.4 -0.25,3.2 -3.25,3.2
  region: -6.75,-1.4 -3.75,-1.4 -3.75,3.2 -6.75,3.2
  region: 3.75,8.3 6.75,8.3 6.75,3.7 3.75,3.7
  region: -10.25,-1.4 -7.25,-1.4 -7.25,3.2 -10.25,3.2
  region: -13.75,-1.4 -10.75,-1.4 -10.75,3.2 -13.75,3.2
  region: 0.25,8.3 3.25,8.3 3.25,3.7 0.25,3.7
  region: -17.25,-1.4 -14.25,-1.4 -14.25,3.2 -17.25,3.2
  region: -20.75,-1.4 -17.75,-1.4 -17.75,3.2 -20.75,3.2
  region: -3.25,8.3 -0.25,8.3 -0.25,3.7 -3.25,3.7
  region: -6.75,8.3 -3.75,8.3 -3.75,3.7 -6.75,3.7
  region: -10.25,8.3 -7.25,8.3 -7.25,3.7 -10.25,3.7
  region: -20.75,8.3 -17.75,8.3 -17.75,3.7 -20.75,3.7
  region: -17.25,8.3 -14.25,8.3 -14.25,3.7 -17.25,3.7
  region: -13.75,8.3 -10.75,8.3 -10.75,3.7 -13.75,3.7
Assembly Notes:
  text "Stencil Thickness: 120um" at -5.048,-6.92 h1
Top Assembly:
  lines w0.1: -24.575,-5.95 -24.575,5.95 24.575,5.95 24.575,-5.95 -24.575,-5.95
Top Designator:
  text ".Designator" at -3.647,-0.357 h1
Top 3D Body:
  lines w0.1: -24.5,-5.8 -24.5,5.8 24.5,5.8 24.5,-5.8 -24.5,-5.8
Top Courtyard:
  lines w0.05: -24.775,-6.15 -24.775,8.5 24.775,8.5 24.775,-6.15 -24.775,-6.15
Top Component Center:
  lines w0.1: -0.5,0 0.5,0 ; 0,-0.5 0,0.5
3D body "691778140024.stp": height 10.82, standoff -1.98, extent -24.5,-5.8 24.5,5.8